# Altium footprint library custom-case.PcbLib: 483 footprints (part 16 of 31)
Each footprint in its own frame and in the unit in brackets; x right, y up, seen from the top. Pads: shape width x height; smd on the part's side, far side on the other; paste and mask are expansions set on the pad; w line width, h text height; cw(c..) or ccw(c..) is an arc to the next point about the centre after c.
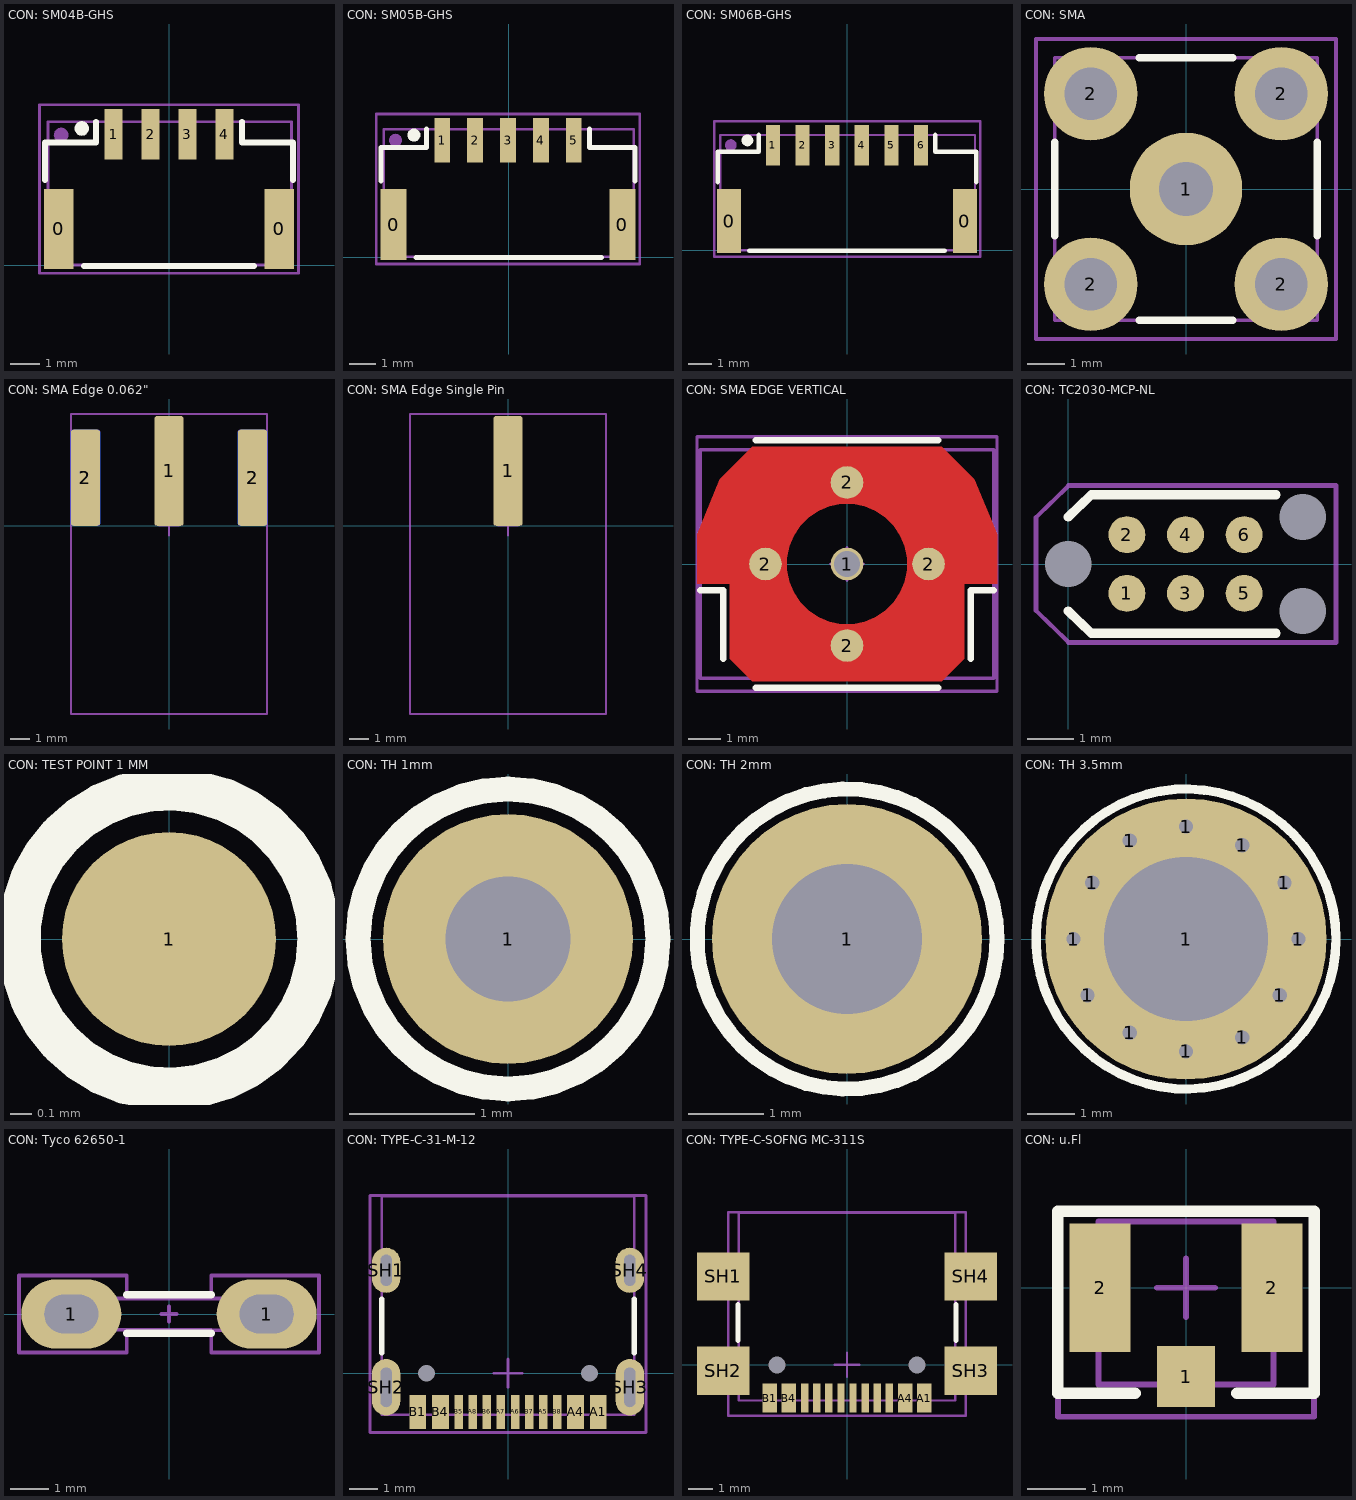
[diagram p15: the footprints below, top view; thin cyan lines are the x and y axes]

## CON: SM04B-GHS [mm]
pads (8):
  rect 1x2.7 smd: 0(-3.725,1.225) 0(3.725,1.225)
  rect 0.6x1.7 smd: 1(-1.875,4.425) 2(-0.625,4.425) 3(0.625,4.425) 4(1.875,4.425)
  round 0.5 on Mech13: ""(-3.65,4.4)
  round 0.5 on Top Overlay: ""(-2.95,4.625)
Top Overlay:
  lines w0.2: -4.2,2.875 -4.2,4.15 -2.475,4.15 -2.475,4.85 ; -2.875,-0.025 2.875,-0.025 ; 2.475,4.85 2.475,4.15 4.2,4.15 4.2,2.875
Top Assy:
  lines w0.1: -4.1,0 -4.1,4.85 4.15,4.85 4.15,0 -4.1,0
Size Area:
  lines w0.1: -4.375,-0.275 4.375,-0.275 4.375,5.425 -4.375,5.425 -4.375,-0.275
3D body "SM04B-GHS-TB.STEP": height 4.32, standoff -0.03, extent -4.1,0 4.15,4.85

## CON: SM05B-GHS [mm]
pads (9):
  rect 1x2.7 smd: 0(-4.375,1.25) 0(4.325,1.25)
  rect 0.6x1.7 smd: 1(-2.525,4.45) 2(-1.275,4.45) 3(-0.025,4.45) 4(1.225,4.45) 5(2.475,4.45)
  round 0.5 on Mech1: ""(-4.3,4.45)
  round 0.5 on Top Overlay: ""(-3.6,4.65)
Top Overlay:
  lines w0.2: -4.85,2.9 -4.85,4.175 -3.125,4.175 -3.125,4.875 ; -3.525,0 3.525,0 ; 3.075,4.875 3.075,4.175 4.8,4.175 4.8,2.9
Top Assy:
  lines w0.1: -4.75,0.025 4.75,0.025 4.75,4.875 -4.75,4.875 -4.75,0.025
Size Area:
  lines w0.1: -5.025,-0.25 4.975,-0.25 4.975,5.45 -5.025,5.45 -5.025,-0.25
3D body "SM05B-GHS-TB.STEP": height 4.35, standoff 0, extent -4.75,0.025 4.75,4.875

## CON: SM06B-GHS [mm]
pads (10):
  rect 1x2.7 smd: 0(-4.975,1.225) 0(4.975,1.225)
  rect 0.6x1.7 smd: 1(-3.125,4.425) 2(-1.875,4.425) 3(-0.625,4.425) 4(0.625,4.425) 5(1.875,4.425) 6(3.125,4.425)
  round 0.5 on Mech1: ""(-4.9,4.425)
  round 0.5 on Top Overlay: ""(-4.2,4.625)
Top Overlay:
  lines w0.2: -5.45,2.875 -5.45,4.15 -3.725,4.15 -3.725,4.85 ; -4.125,-0.025 4.125,-0.025 ; 3.725,4.85 3.725,4.15 5.45,4.15 5.45,2.875
Top Assy:
  lines w0.1: -5.35,0 5.4,0 5.4,4.85 -5.35,4.85 -5.35,0
Size Area:
  lines w0.1: -5.6,-0.275 5.625,-0.275 5.625,5.425 -5.6,5.425 -5.6,-0.275
3D body "SM06B-GHS-TB.STEP": height 4.33, standoff -0.02, extent -5.35,0 5.4,4.85

## CON: SMA [mm]
pads (5):
  round 3 hole 1.45: 1(0,0)
  round 2.5 hole 1.4: 2(-2.54,-2.54) 2(-2.54,2.54) 2(2.54,-2.54) 2(2.54,2.54)
Top Overlay:
  lines w0.2: -3.5,-1.25 -3.5,1.25 ; -1.25,-3.5 1.25,-3.5 ; -1.25,3.5 1.25,3.5 ; 3.5,-1.25 3.5,1.25
Top Assy:
  lines w0.1: -3.5,-3.5 3.5,-3.5 3.5,3.5 -3.5,3.5 -3.5,-3.5
Size Area:
  lines w0.1: -0.5,0 0.5,0 ; 0,-0.5 0,0.5 ; -4,-4 -4,4 4,4 4,-4 -4,-4
3D body "SMA_connector.STEP": height 9.53, standoff -3.94, extent -3.5,-3.5 3.5,3.5

## CON: SMA Edge 0.062" [mm]
pads (5):
  rrect20% 1.5x5.6 smd mask+0.102: 1(0,2.8)
  rrect20% 1.5x4.9 smd mask+0.102: 2(-4.26,2.45) 2(4.26,2.45)
  rrect20% 1.5x4.9 smd far side mask+0.102: 2(-4.26,2.45) 2(4.26,2.45)
Top Assy:
  lines w0.1: -5,-9.6 5,-9.6 5,5.7 -5,5.7 -5,-9.6
Size Area:
  lines w0.1: -0.5,0 0.5,0 ; 0,-0.5 0,0.5 ; -5,-9.6 -5,5.7 5,5.7 5,-9.6 -5,-9.6
3D body "2985-6035.STEP": height 4.46, standoff -3.46, extent -4.765,-9.58 4.765,4.7

## CON: SMA Edge Single Pin [mm]
pads (1):
  rrect20% 1.5x5.6 smd mask+0.102: 1(0,2.8)
Top Assy:
  lines w0.1: -5,-9.6 5,-9.6 5,5.7 -5,5.7 -5,-9.6
Size Area:
  lines w0.1: -0.5,0 0.5,0 ; 0,-0.5 0,0.5 ; -5,-9.6 -5,5.7 5,5.7 5,-9.6 -5,-9.6
3D body "SMA-22 F ASSEMBLY.STEP": height 3.68, standoff -2.36, extent -8.05,-9.6 8,5.05

## CON: SMA EDGE VERTICAL [mm]
pads (5):
  round 1 / inner round 0.8 / far side round 0.9 hole 0.8: 1(0,0)
  round 1 smd: 2(-2.5,0) 2(0,-2.5) 2(0,2.5) 2(2.5,0)
Top Layer:
  region: -3.6,-2.9 -2.9,-3.6 -1.85,-3.6 -1.85,3.6 -2.9,3.6 -3.9,2.6 -4.6,0.91 -4.6,-0.6 -3.6,-0.6
  region: 3.6,-2.9 2.9,-3.6 1.85,-3.6 1.85,3.6 2.9,3.6 3.9,2.6 4.6,0.91 4.6,-0.6 3.6,-0.6
  region: -1.85,0 -1.841,0.181 -1.77,0.537 -1.632,0.872 -1.43,1.174 -1.174,1.43 -0.872,1.632 -0.537,1.77 -0.181,1.841 0,1.85 0.181,1.841 0.537,1.77 0.872,1.632 1.174,1.43 1.43,1.174 1.632,0.872 1.77,0.537 1.841,0.181 1.85,0 1.85,3.6 -1.85,3.6
  region: 1.85,0 1.841,-0.181 1.77,-0.537 1.632,-0.872 1.43,-1.174 1.174,-1.43 0.872,-1.632 0.537,-1.77 0.181,-1.841 0,-1.85 -0.181,-1.841 -0.537,-1.77 -0.872,-1.632 -1.174,-1.43 -1.43,-1.174 -1.632,-0.872 -1.77,-0.537 -1.841,-0.181 -1.85,0 -1.85,-3.6 1.85,-3.6
Top Overlay:
  lines w0.2: -4.5,-0.8 -3.8,-0.8 -3.8,-2.9 ; -2.8,-3.8 2.8,-3.8 ; -2.8,3.8 2.8,3.8 ; 3.8,-2.9 3.8,-0.8 4.5,-0.8
Top Paste:
  region: -1.6,1.2 -1.688,1.112 -2,0.359 -2,-0.359 -1.688,-1.112 -1.6,-1.2 -3.3,-2.9 -3.4,-2.8 -3.4,2.8 -3.3,2.9
  region: 1.2,1.6 1.112,1.688 0.359,2 -0.359,2 -1.112,1.688 -1.2,1.6 -2.9,3.3 -2.8,3.4 2.8,3.4 2.9,3.3
  region: 1.6,-1.2 1.688,-1.112 2,-0.359 2,0.359 1.688,1.112 1.6,1.2 3.3,2.9 3.4,2.8 3.4,-2.8 3.3,-2.9
  region: -1.2,-1.6 -1.112,-1.688 -0.359,-2 0.359,-2 1.112,-1.688 1.2,-1.6 2.9,-3.3 2.8,-3.4 -2.8,-3.4 -2.9,-3.3
Top Assy:
  lines w0.1: -4.5,-3.5 -4.5,3.5 4.5,3.5 4.5,-3.5 -4.5,-3.5
Size Area:
  lines w0.1: -0.5,0 0.5,0 ; 0,-0.5 0,0.5 ; -4.6,-3.9 4.6,-3.9 4.6,3.9 -4.6,3.9 -4.6,-3.9
3D body "HJ-SMA666.STEP": height 13, standoff -1.95, extent -4.5,-3.5 4.498,3.5

## CON: TC2030-MCP-NL [mm]
pads (9):
  round 0.8 smd: 1(1.27,-0.635) 2(1.27,0.635) 3(2.54,-0.635) 4(2.54,0.635) 5(3.81,-0.635) 6(3.81,0.635)
  round 0.8 hole 1: ""(0,0) ""(5.08,-1.016) ""(5.08,1.016)
Top Overlay:
  lines w0.2: 0,-1.016 0.5,-1.5 1,-1.5 4.5,-1.5 ; 0,1.016 0.5,1.5 1,1.5 4.5,1.5
Size Area:
  lines w0.1: -0.7,-1.008 -0.7,1.008 0.003,1.7 5.8,1.7 5.8,-1.7 0.003,-1.7 -0.7,-1.008

## CON: TEST POINT 1 MM [mm]
pads (1):
  round 1 smd: 1(0,0)
Top Overlay:
  circle w0.2: c0,0 r0.7
Top Assy:
  circle w0.1: c0,0 r0.7
Size Area:
  circle w0.1: c0,0 r0.7

## CON: TH 1mm [mm]
pads (1):
  round 2 hole 1 mask+0.075: 1(0,0)
Top Overlay:
  circle w0.2: c0,0 r1.2
Size Area:
  circle w0.1: c0,0 r1.2
  lines w0.1: -0.5,0 0.5,0 ; 0,-0.5 0,0.5

## CON: TH 2mm [mm]
pads (1):
  round 3.6 hole 2 mask+0.075: 1(0,0)
Top Overlay:
  circle w0.2: c0,0 r2
Size Area:
  circle w0.1: c0,0 r2
  lines w0.1: -0.5,0 0.5,0 ; 0,-0.5 0,0.5

## CON: TH 3.5mm [mm]
pads (13):
  round 0.7 hole 0.3: 1(-2.4,0) 1(-2.1,-1.2) 1(-2,1.2) 1(-1.2,-2) 1(-1.2,2.1) 1(0,-2.4) 1(0,2.4) 1(1.2,-2.1) 1(1.2,2) 1(2,-1.2) 1(2.1,1.2) 1(2.4,0)
  round 6 hole 3.5: 1(0,0)
Top Overlay:
  circle w0.2: c0,0 r3.2

## CON: Tyco 62650-1 [mm]
pads (2):
  oval 2.6x1.8 hole 1 slot 1.4 at 0 deg mask+0.075: 1(-2.54,0) 1(2.54,0)
Top Overlay:
  lines w0.2: -1.1,-0.5 1.1,-0.5 ; -1.1,0.5 1.1,0.5
Top Assy:
  lines w0.1: -3.563,-0.405 -3.563,0.4 3.55,0.4 3.55,-0.425 -3.563,-0.405
Size Area:
  lines w0.1: -0.2,0 0.2,0 ; 0,-0.2 0,0.2 ; -3.9,-1 -3.9,1 -1.1,1 -1.1,0.4 1.1,0.4 1.1,1 3.9,1 3.9,-1 1.1,-1 1.1,-0.418 -1.1,-0.412 -1.1,-1 -3.9,-1
3D body "Tyco 62650-1 v2.step": height 9.24, standoff -3.13, extent -3.555,-0.4 3.555,0.4

## CON: TYPE-C-31-M-12 [mm]
pads (18):
  rect 0.6x1.2 smd mask+0.075: A1(3.2,-1.375) A4(2.4,-1.375) B1(-3.2,-1.375) B4(-2.4,-1.375)
  rect 0.3x1.2 smd mask+0.075: A5(1.25,-1.375) A6(0.25,-1.375) A7(-0.25,-1.375) A8(-1.25,-1.375) B5(-1.75,-1.375) B6(-0.75,-1.375) B7(0.75,-1.375) B8(1.75,-1.375)
  round 0 hole 0.6 mask+0.075: MH(-2.89,0) MH(2.89,0)
  oval 1x1.6 hole 0.4 slot 1.1 at 90 deg mask+0.075: SH1(-4.32,3.65) SH4(4.32,3.65)
  oval 1x2 hole 0.4 slot 1.4 at 90 deg mask+0.075: SH2(-4.32,-0.5) SH3(4.32,-0.5)
Top Overlay:
  lines w0.2: -4.475,0.725 -4.475,2.625 ; 4.475,0.725 4.475,2.625
Top Assy:
  lines w0.1: -4.475,-1.475 -4.475,6.275 4.475,6.275 4.475,-1.475 -4.475,-1.475
Size Area:
  lines w0.1: -0.5,0 0.5,0 ; 0,-0.5 0,0.5 ; -4.9,-2.1 4.9,-2.1 4.9,6.3 -4.9,6.3 -4.9,-2.1
3D body "User Library-USB - C.STEP": height 3.26, standoff -1, extent -4.475,-1.475 4.475,6.275

## CON: TYPE-C-SOFNG MC-311S [mm]
pads (18):
  rect 0.6x1.2 smd mask+0.075: A1(3.2,-1.375) A4(2.4,-1.375) B1(-3.2,-1.375) B4(-2.4,-1.375)
  rect 0.3x1.2 smd mask+0.075: A5(1.25,-1.375) A6(0.25,-1.375) A7(-0.25,-1.375) A8(-1.25,-1.375) B5(-1.75,-1.375) B6(-0.75,-1.375) B7(0.75,-1.375) B8(1.75,-1.375)
  round 0 hole 0.7 mask+0.075: MH(-2.89,0) MH(2.89,0)
  rect 2.18x2 smd mask+0.075: SH1(-5.11,3.65) SH2(-5.11,-0.25) SH3(5.11,-0.25) SH4(5.11,3.65)
Top Overlay:
  lines w0.2: -4.5,1 -4.5,2.5 ; 4.5,1 4.5,2.5
Top Assy:
  lines w0.1: -4.475,-1.475 -4.475,6.275 4.475,6.275 4.475,-1.475 -4.475,-1.475
Size Area:
  lines w0.1: -0.5,0 0.5,0 ; 0,-0.5 0,0.5 ; -4.9,-2.1 4.9,-2.1 4.9,6.3 -4.9,6.3 -4.9,-2.1
3D body "USB_type_C_smd.stp": height 3.2, standoff -0.7, extent -5.5,-1.6 5.5,6.25

## CON: u.Fl [mm]
height 1.5
pads (3):
  rect 1x1.05 smd: 1(0,-1.525)
  rect 1.05x2.2 smd: 2(-1.475,0) 2(1.475,0)
Top Overlay:
  lines w0.2: -0.875,-1.813 -2.2,-1.813 -2.2,1.312 2.2,1.312 2.2,-1.813 0.875,-1.813
Top Assy:
  lines w0.1: -1.5,-1.663 -1.5,1.137 1.5,1.137 1.5,-1.663 -1.5,-1.663
Size Area:
  lines w0.1: -0.5,0 0.5,0 ; 0,-0.5 0,0.5 ; -2.2,-2.213 2.2,-2.213 2.2,1.312 -2.2,1.312 -2.2,-2.213
3D body "IPX.step": height 1.27, standoff -0.01, extent -1.5,-1.712 1.5,1.138